# Altium footprint library C_0402_1005Metric.PcbLib: 1 footprints
Each footprint in its own frame and in the unit in brackets; x right, y up, seen from the top. Pads: shape width x height; smd on the part's side, far side on the other; paste and mask are expansions set on the pad; w line width, h text height; cw(c..) or ccw(c..) is an arc to the next point about the centre after c.
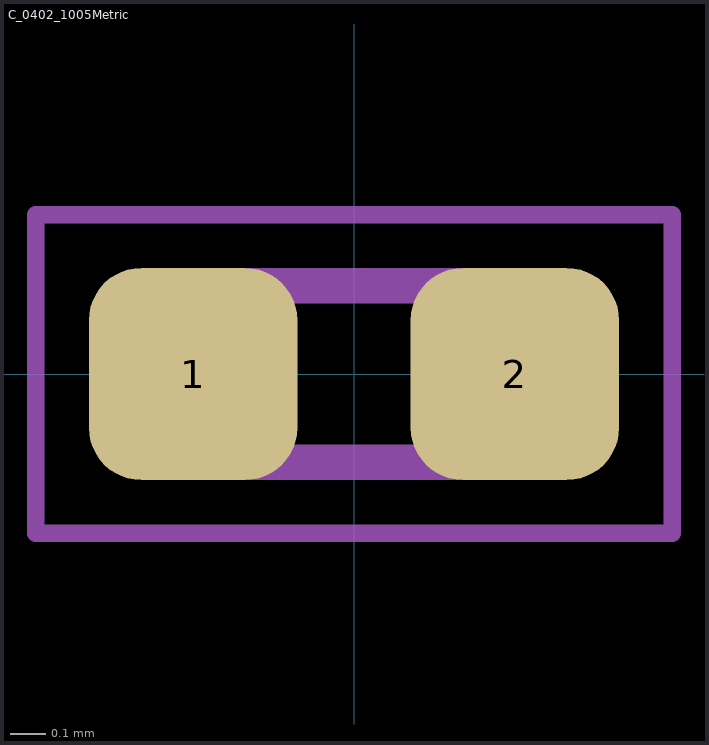
[diagram p0: the footprint, top view; thin cyan lines are the x and y axes]

## C_0402_1005Metric [mm] "Capacitor SMD 0402 (1005 Metric); IPC-7351B chip_small density B; generated by ecadlib"
pads (2):
  rrect50% 0.59x0.6 smd: 1(-0.455,0) 2(0.455,0)
Top Overlay:
  text ".Designator" at -1.391,0.65 h1
Mechanical 13:
  lines w0.1: -0.5,-0.25 0.5,-0.25 0.5,0.25 -0.5,0.25 -0.5,-0.25
  text ".Comment" at -3.708,-1.65 h1
Mechanical 15:
  lines w0.05: -0.9,-0.45 0.9,-0.45 0.9,0.45 -0.9,0.45 -0.9,-0.45